# Altium schematic symbol library dmp3099l-7.SchLib: 1 symbol
Pins are listed as number, name and electrical type; pins without a type are passive.

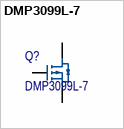
[diagram p0: symbol DMP3099L-7]

## DMP3099L-7
designator Q?
Transistor, MOSFET, P-Channel, 30V, 3.8A, 1.08W, SOT-23, SMD; Manufacturer: Diodes Inc.; Drain to Source Breakdown Voltage: -30V; Drain to Source Resistance: 65mΩ; Element Configuration: Single; Fall Time: 15ns; Gate to Source Voltage (Vgs): 20V; Input Capacitance: 563pF; Max Junction Temperature (Tj): 150°C; Number of Channels: 1; Rise Time: 5ns; Threshold Voltage: -2.1V; Turn-Off Delay Time: 31ns; Turn-On Delay Time: 4.8ns; Supplier: RS; Supplier Part Number: 8270503P; Manufacturer Part Number: DMP3099L-7; RoHS: Compliant; Category: MOSFETs; Stock: 444300; Case/Package: SOT-23; China RoHS: Compliant; Contact Plating: Tin; Continuous Drain Current (ID): 3.8A; Country of Origin: Mainland China; Drain to Source Voltage (Vds): -30V; Export Control Classification Number (ECCN) Code: EAR99; Height: 1.1mm; Introduction Date: 2013-05-28; Lead Free: Lead Free; Length: 3mm; Lifecycle Status: Production; Max Operating Temperature: 150°C; Max Power Dissipation: 1.08W; Min Breakdown Voltage: 30V; Min Operating Temperature: -55°C; Mounting Technology: Surface Mount; Number of Elements: 1; Pins: 3; Number of Terminals: 3; Power Dissipation: 1.08W; Radiation Hardening: No; Ratings: AEC-Q101; Rds On Max: 65mΩ; REACH SVHC: Unaffected; Schedule B: 8541290080, 8541290080|8541290080|8541290080|8541290080|8541290080; Weight: 7.994566mg; Width: 1.4mm; ComponentLink1URL: https://datasheet.octopart.com:443/DMP3099L-7-Diodes-Inc.-datasheet-171818965.pdf?src-supplier=Newark; ComponentLink1Description: https://datasheet.octopart.com:443/DMP3099L-7-Diodes-Inc.-datasheet-171818965.pdf?src-supplier=Newark; ComponentLink2URL: https://datasheet.octopart.com:443/DMP3099L-7-Diodes-Inc.-datasheet-17559051.pdf?src-supplier=Newark; ComponentLink2Description: https://datasheet.octopart.com:443/DMP3099L-7-Diodes-Inc.-datasheet-17559051.pdf?src-supplier=Newark; ComponentLink3URL: https://sigma.octopart.com:443/138706058/technical_drawing/Diodes-Inc.-DMP3099L-7.pdf?src-supplier=Diodes+Inc+SCT; ComponentLink3Description: https://sigma.octopart.com:443/138706058/technical_drawing/Diodes-Inc.-DMP3099L-7.pdf?src-supplier=Diodes+Inc+SCT
footprint sot-23-3-p0.95 (SOT23, 3-Leads, Body 2.90x2.80mm, Pitch 0.95mm, IPC Medium Density)
pins: 1 G, 2 S, 3 D